# Altium footprint library PcbLib1.PcbLib: 37 footprints (part 2 of 3)
Each footprint in its own frame and in the unit in brackets; x right, y up, seen from the top. Pads: shape width x height; smd on the part's side, far side on the other; paste and mask are expansions set on the pad; w line width, h text height; cw(c..) or ccw(c..) is an arc to the next point about the centre after c.
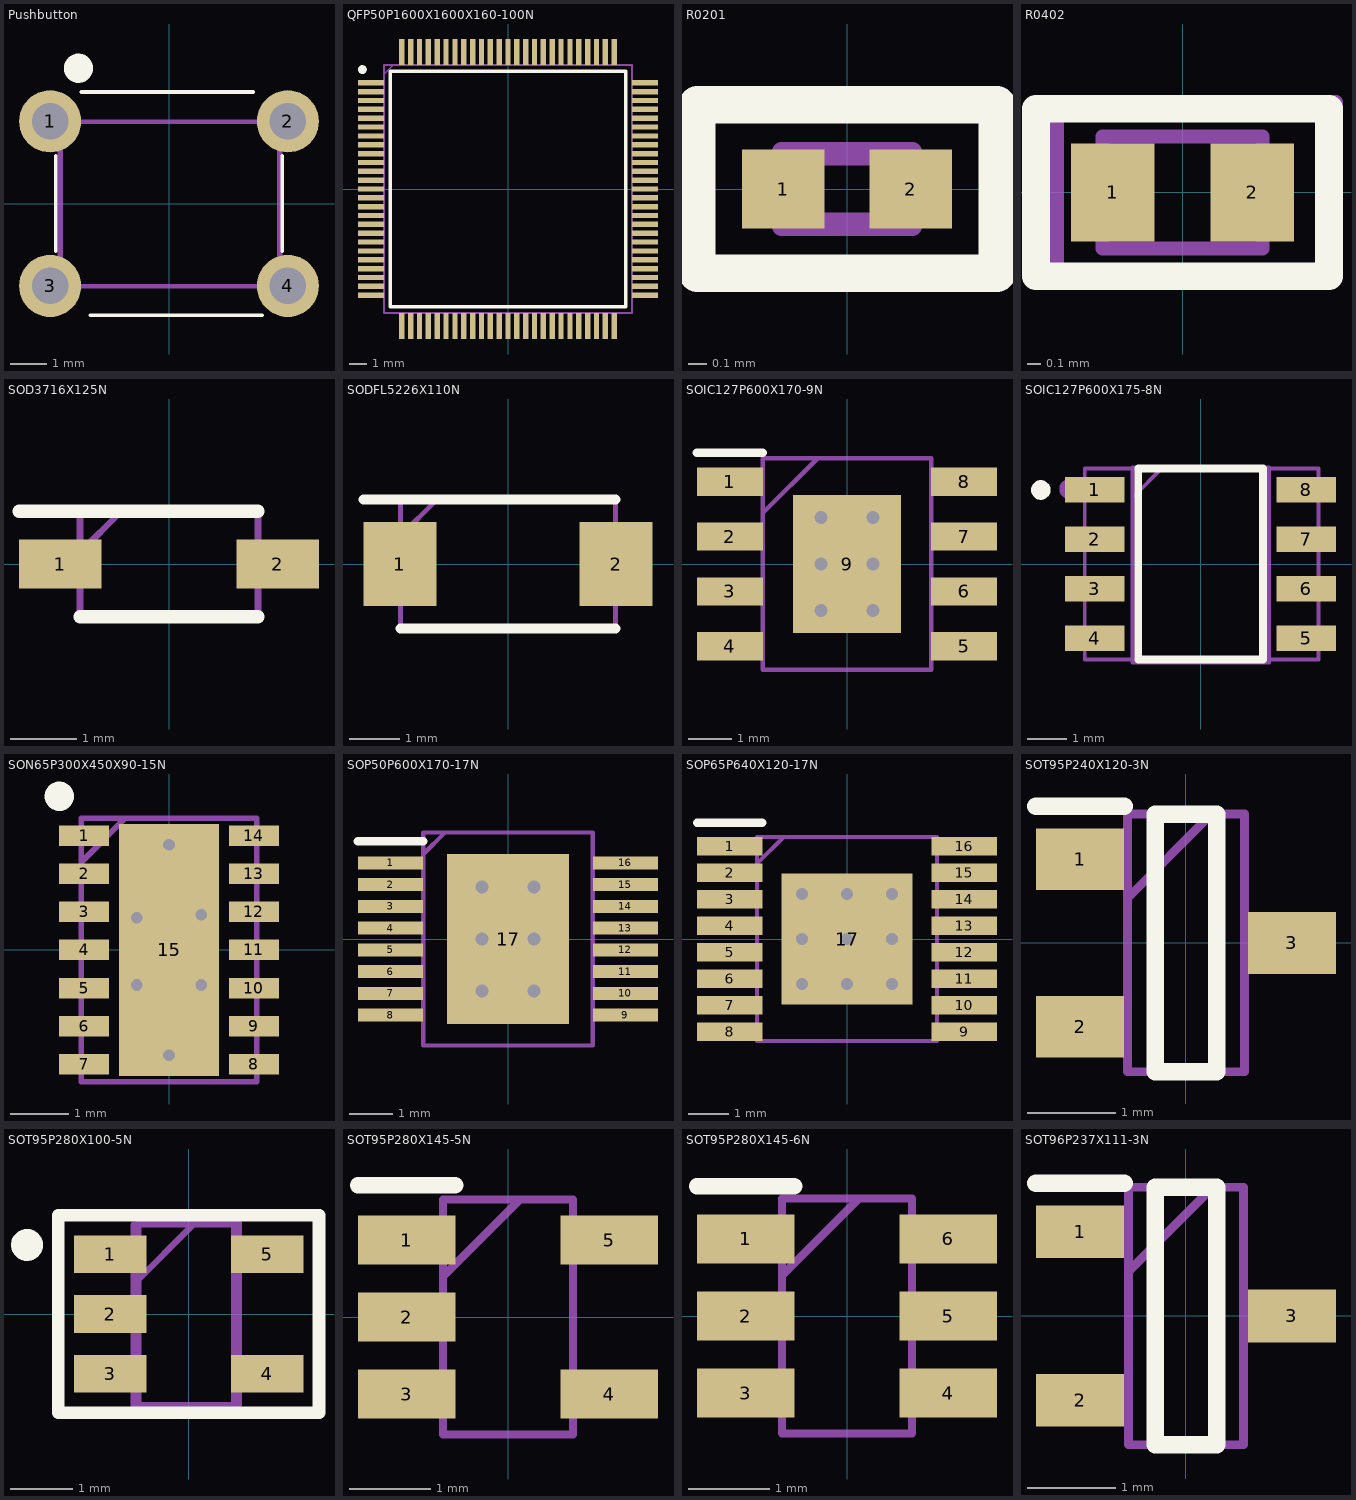
[diagram p1: the footprints below, top view; thin cyan lines are the x and y axes]

## Pushbutton [mm]
pads (4):
  round 1.7 hole 1: 1(-3.25,2.25) 2(3.25,2.25) 3(-3.25,-2.25) 4(3.25,-2.25)
Top Overlay:
  circle w0.4: c-2.475,3.7 r0.2
  lines w0.1: -3.1,-1.3 -3.1,1.3 ; -2.4,3.05 2.3,3.05 ; -2.15,-3.05 2.55,-3.05 ; 3.1,-1.3 3.1,1.3
Mechanical 13:
  circle w0.254: c-3.675,1.925 r0.135
  lines w0.1: -2.95,-2.275 -2.95,2.225 3.05,2.225 3.05,-2.275 -2.95,-2.275
  text ".Designator" at -2.55,-0.242 h0.7
Mechanical 29:
  circle w0.254: c-3.725,1.95 r0.135
  lines w0.1: -3,-2.25 -3,2.25 3,2.25 3,-2.25 -3,-2.25
  text ".Designator" at -2.6,-0.217 h0.7
Mechanical 30:
  text ".Comment" at -3.475,-1.6 h1
3D body "User Library-FSM6JHX(1-1977120-0).STEP": height 7, standoff -3.51, extent -3.9,-2.995 3.9,2.995

## QFP50P1600X1600X160-100N [mm]
pads (100):
  rect 1.475x0.3 smd: 1(-7.738,6) 2(-7.738,5.5) 3(-7.738,5) 4(-7.738,4.5) 5(-7.738,4) 6(-7.738,3.5) 7(-7.738,3) 8(-7.738,2.5) 9(-7.738,2) 10(-7.738,1.5) 11(-7.738,1) 12(-7.738,0.5) 13(-7.738,0) 14(-7.738,-0.5) 15(-7.738,-1) 16(-7.738,-1.5) 17(-7.738,-2) 18(-7.738,-2.5) 19(-7.738,-3) 20(-7.738,-3.5) 21(-7.738,-4) 22(-7.738,-4.5) 23(-7.738,-5) 24(-7.738,-5.5) 25(-7.738,-6) 51(7.738,-6) 52(7.738,-5.5) 53(7.738,-5) 54(7.738,-4.5) 55(7.738,-4) 56(7.738,-3.5) 57(7.738,-3) 58(7.738,-2.5) 59(7.738,-2) 60(7.738,-1.5) 61(7.738,-1) 62(7.738,-0.5) 63(7.738,0) 64(7.738,0.5) 65(7.738,1) 66(7.738,1.5) 67(7.738,2) 68(7.738,2.5) 69(7.738,3) 70(7.738,3.5) 71(7.738,4) 72(7.738,4.5) 73(7.738,5) 74(7.738,5.5) 75(7.738,6)
  rect 0.3x1.475 smd: 26(-6,-7.738) 27(-5.5,-7.738) 28(-5,-7.738) 29(-4.5,-7.738) 30(-4,-7.738) 31(-3.5,-7.738) 32(-3,-7.738) 33(-2.5,-7.738) 34(-2,-7.738) 35(-1.5,-7.738) 36(-1,-7.738) 37(-0.5,-7.738) 38(0,-7.738) 39(0.5,-7.738) 40(1,-7.738) 41(1.5,-7.738) 42(2,-7.738) 43(2.5,-7.738) 44(3,-7.738) 45(3.5,-7.738) 46(4,-7.738) 47(4.5,-7.738) 48(5,-7.738) 49(5.5,-7.738) 50(6,-7.738) 76(6,7.738) 77(5.5,7.738) 78(5,7.738) 79(4.5,7.738) 80(4,7.738) 81(3.5,7.738) 82(3,7.738) 83(2.5,7.738) 84(2,7.738) 85(1.5,7.738) 86(1,7.738) 87(0.5,7.738) 88(0,7.738) 89(-0.5,7.738) 90(-1,7.738) 91(-1.5,7.738) 92(-2,7.738) 93(-2.5,7.738) 94(-3,7.738) 95(-3.5,7.738) 96(-4,7.738) 97(-4.5,7.738) 98(-5,7.738) 99(-5.5,7.738) 100(-6,7.738)
Top Overlay:
  circle w0.25: c-8.225,6.75 r0.125
  lines w0.2: -6.65,-6.65 -6.65,6.65 6.65,6.65 6.65,-6.65 -6.65,-6.65
Mechanical 13:
  lines w0.1: -7,6.5 -6.5,7 ; -7,-7 -7,7 7,7 7,-7 -7,-7
  text ".Designator" at -3.857,-0.356 h1
3D body "TMS5700332BPZQQ1.stp": height 1.6, standoff 0, extent -8,-8 8,8

## R0201 [mm]
pads (2):
  rect 0.44x0.42 smd: 1(-0.34,0) 2(0.34,0)
Top Overlay:
  lines w0.2: -0.8,-0.45 -0.8,0.45 0.8,0.45 0.8,-0.45 -0.8,-0.45
Mechanical 13:
  lines w0.1: -0.35,-0.175 -0.35,0.175 0.35,0.175 0.35,-0.175 -0.35,-0.175
  text ".Designator" at -0.65,-0.183 h0.5
Mechanical 29:
  lines w0.1: -0.35,-0.2 0.35,-0.2 0.35,0.2 -0.35,0.2 -0.35,-0.2
  text ".Designator" at -0.25,0 h0.3
Mechanical 30:
  text ".Comment" at -1.225,-0.7 h0.5
3D body "RC0201FR-0712KL.stp": height 0.26, standoff 0, extent -0.3,-0.15 0.3,0.15

## R0402 [mm]
pads (2):
  rect 0.6x0.7 smd: 1(-0.5,0) 2(0.5,0)
Top Overlay:
  lines w0.2: -1.05,-0.6 -1.05,0.6 1.05,0.6 1.05,-0.6 -1.05,-0.6
Mechanical 13:
  lines w0.1: -0.9,-0.6 -0.9,0.65 1.1,0.65 1.1,-0.6 -0.9,-0.6
  text ".Designator" at -1.307,-0.431 h1
Mechanical 29:
  lines w0.1: -0.575,-0.4 0.575,-0.4 0.575,0.4 -0.575,0.4 -0.575,-0.4
  text "'.Designator'" at -0.675,-0.117 h0.4
Mechanical 30:
  text ".Comment" at -1.425,-0.825 h0.5
3D body "RC0402N_YAG.step": height 0.51, standoff 0.01, extent -0.533,-0.35 0.533,0.361

## SOD3716X125N [mm]
pads (2):
  rect 1.25x0.75 smd: 1(-1.65,0) 2(1.65,0)
Top Overlay:
  lines w0.2: -2.275,0.8 1.35,0.8 ; -1.35,-0.8 1.35,-0.8
Mechanical 13:
  lines w0.1: -1.35,0.175 -0.725,0.8 ; -1.35,-0.8 1.35,-0.8 1.35,0.8 -1.35,0.8 -1.35,-0.8
  text ".Designator" at -1.963,-0.528 h1.1
3D body "1N5819HW-7-F.stp": height 1.25, standoff 0.06, extent -1.35,-0.8 1.35,0.8

## SODFL5226X110N [mm]
pads (2):
  rect 1.46x1.67 smd: 1(-2.15,0) 2(2.15,0)
Top Overlay:
  lines w0.2: -2.88,1.288 2.138,1.288 ; -2.138,-1.288 2.138,-1.288
Mechanical 13:
  lines w0.1: -2.138,0.558 -1.408,1.288 ; -2.138,-1.288 2.138,-1.288 2.138,1.288 -2.138,1.288 -2.138,-1.288
  text ".Designator" at -2.063,-0.428 h1.1
3D body "STPS2L25AFN.stp": height 1.1, standoff 0, extent -2.588,-1.288 2.588,1.288

## SOIC127P600X170-9N [mm]
pads (9):
  rect 1.525x0.65 smd: 1(-2.712,1.905) 2(-2.712,0.635) 3(-2.712,-0.635) 4(-2.712,-1.905) 5(2.712,-1.905) 6(2.712,-0.635) 7(2.712,0.635) 8(2.712,1.905)
  rect 2.51x3.2 smd paste-4: 9(0,0)
via -0.6,1.075 diameter 0.7 hole 0.3
via 0.6,1.075 diameter 0.7 hole 0.3
via -0.6,0 diameter 0.7 hole 0.3
via -0.6,-1.075 diameter 0.7 hole 0.3
via 0.6,0 diameter 0.7 hole 0.3
via 0.6,-1.075 diameter 0.7 hole 0.3
Top Overlay:
  lines w0.2: -3.475,2.58 -1.95,2.58
Top Paste:
  rectangle: 0.15,-1.55 1.05,-0.65
  rectangle: 0.15,-0.45 1.05,0.45
  rectangle: 0.15,0.65 1.05,1.55
  rectangle: -1.05,-1.55 -0.15,-0.65
  rectangle: -1.05,-0.45 -0.15,0.45
  rectangle: -1.05,0.65 -0.15,1.55
Mechanical 13:
  lines w0.1: -1.95,1.18 -0.68,2.45 ; -1.95,-2.45 1.95,-2.45 1.95,2.45 -1.95,2.45 -1.95,-2.45
  text ".Designator" at -2.363,-0.653 h1.1
3D body "A7985ATR.stp": height 1.7, standoff 0, extent -3,-2.45 3,2.45

## SOIC127P600X175-8N [mm]
pads (8):
  rect 1.525x0.65 smd: 1(-2.712,1.905) 2(-2.712,0.635) 3(-2.712,-0.635) 4(-2.712,-1.905) 5(2.712,-1.905) 6(2.712,-0.635) 7(2.712,0.635) 8(2.712,1.905)
Top Overlay:
  circle w0.254: c-4.1,1.9 r0.125
  lines w0.2: -1.6,-2.45 -1.6,2.45 1.6,2.45 1.6,-2.45 -1.6,-2.45
Mechanical 13:
  lines w0.1: -1.725,1.725 -0.975,2.475 ; -1.75,-2.525 1.75,-2.525 1.75,2.475 -1.75,2.475 -1.75,-2.525
  text ".Designator" at -1.938,-0.378 h1.1
Mechanical 29:
  circle w0.254: c-3.375,1.925 r0.125
  lines w0.1: -2.975,-2.45 -2.975,2.45 3.025,2.45 3.025,-2.45 -2.975,-2.45
  text ".Designator" at -3,-0.467 h1
Mechanical 30:
  text ".Comment" at -3,-0.45 h1
3D body "NE555DR.stp": height 1.75, standoff 0, extent -3,-2.45 3,2.45

## SON65P300X450X90-15N [mm]
pads (15):
  rect 0.85x0.35 smd: 1(-1.45,1.95) 2(-1.45,1.3) 3(-1.45,0.65) 4(-1.45,0) 5(-1.45,-0.65) 6(-1.45,-1.3) 7(-1.45,-1.95) 8(1.45,-1.95) 9(1.45,-1.3) 10(1.45,-0.65) 11(1.45,0) 12(1.45,0.65) 13(1.45,1.3) 14(1.45,1.95)
  rect 1.7x4.3 smd paste-5: 15(0,0)
via 0,1.8 diameter 0.5 hole 0.2
via -0.55,0.55 diameter 0.5 hole 0.2
via -0.55,-0.6 diameter 0.5 hole 0.2
via 0,-1.8 diameter 0.5 hole 0.2
via 0.55,-0.6 diameter 0.5 hole 0.2
via 0.55,0.6 diameter 0.5 hole 0.2
Top Overlay:
  circle w0.25: c-1.875,2.625 r0.125
Top Paste:
  rectangle: -0.55,-2.1 0.55,-1
  rectangle: -0.55,-0.55 0.55,0.55
  rectangle: -0.55,1 0.55,2.1
Mechanical 13:
  lines w0.1: -1.5,1.5 -0.75,2.25 ; -1.5,-2.25 1.5,-2.25 1.5,2.25 -1.5,2.25 -1.5,-2.25
  text ".Designator" at -1.988,-0.378 h1.1
3D body "TCAN1043DMTRQ1.stp": height 0.9, standoff 0, extent -1.55,-2.25 1.55,2.25

## SOP50P600X170-17N [mm]
pads (17):
  rect 1.5x0.3 smd: 1(-2.7,1.75) 2(-2.7,1.25) 3(-2.7,0.75) 4(-2.7,0.25) 5(-2.7,-0.25) 6(-2.7,-0.75) 7(-2.7,-1.25) 8(-2.7,-1.75) 9(2.7,-1.75) 10(2.7,-1.25) 11(2.7,-0.75) 12(2.7,-0.25) 13(2.7,0.25) 14(2.7,0.75) 15(2.7,1.25) 16(2.7,1.75)
  rect 2.8x3.91 smd paste-4: 17(0,0)
via 0.6,-1.2 diameter 0.7 hole 0.3
via -0.6,-1.2 diameter 0.7 hole 0.3
via -0.6,0 diameter 0.7 hole 0.3
via -0.6,1.2 diameter 0.7 hole 0.3
via 0.6,1.2 diameter 0.7 hole 0.3
via 0.6,0 diameter 0.7 hole 0.3
Top Overlay:
  lines w0.2: -3.45,2.25 -1.95,2.25
Top Paste:
  rectangle: -1.25,-0.55 -0.15,0.55
  rectangle: 0.15,-0.55 1.25,0.55
  rectangle: 0.15,-1.85 1.25,-0.75
  rectangle: -1.25,-1.85 -0.15,-0.75
  rectangle: 0.15,0.75 1.25,1.85
  rectangle: -1.25,0.75 -0.15,1.85
Mechanical 13:
  lines w0.1: -1.95,1.95 -1.45,2.45 ; -1.95,-2.45 -1.95,2.45 1.95,2.45 1.95,-2.45 -1.95,-2.45
  text ".Designator" at -2.163,-0.653 h1.1
3D body "VND7020AJTR.stp": height 1.7, standoff 0, extent -3,-2.45 3,2.45

## SOP65P640X120-17N [mm]
pads (17):
  rect 1.6x0.45 smd: 1(-2.875,2.275) 2(-2.875,1.625) 3(-2.875,0.975) 4(-2.875,0.325) 5(-2.875,-0.325) 6(-2.875,-0.975) 7(-2.875,-1.625) 8(-2.875,-2.275) 9(2.875,-2.275) 10(2.875,-1.625) 11(2.875,-0.975) 12(2.875,-0.325) 13(2.875,0.325) 14(2.875,0.975) 15(2.875,1.625) 16(2.875,2.275)
  rect 3.2x3.2 smd paste-3: 17(0,0)
via 0,0 diameter 0.7 hole 0.3
via -1.1,0 diameter 0.7 hole 0.3
via 1.1,0 diameter 0.7 hole 0.3
via -1.1,1.1 diameter 0.7 hole 0.3
via -1.1,-1.1 diameter 0.7 hole 0.3
via 0,-1.1 diameter 0.7 hole 0.3
via 0,1.1 diameter 0.7 hole 0.3
via 1.1,-1.1 diameter 0.7 hole 0.3
via 1.1,1.1 diameter 0.7 hole 0.3
Top Overlay:
  lines w0.2: -3.675,2.85 -2.075,2.85
Top Paste:
  rectangle: -1.525,0.625 -0.625,1.525
  rectangle: -1.525,-0.45 -0.625,0.45
  rectangle: -1.525,-1.525 -0.625,-0.625
  rectangle: -0.45,0.625 0.45,1.525
  rectangle: -0.45,-0.45 0.45,0.45
  rectangle: -0.45,-1.525 0.45,-0.625
  rectangle: 0.625,0.625 1.525,1.525
  rectangle: 0.625,-0.45 1.525,0.45
  rectangle: 0.625,-1.525 1.525,-0.625
Mechanical 13:
  lines w0.1: -2.2,1.85 -1.55,2.5 ; -2.2,-2.5 -2.2,2.5 2.2,2.5 2.2,-2.5 -2.2,-2.5
  text ".Designator" at -2.213,-0.703 h1.1
3D body "A7987TR.stp": height 1.2, standoff 0, extent -3.2,-2.5 3.2,2.5

## SOT95P240X120-3N [mm]
pads (3):
  rect 1x0.7 smd: 1(-1.2,0.95) 2(-1.2,-0.95) 3(1.2,0)
Top Overlay:
  lines w0.2: -1.7,1.55 -0.7,1.55 ; -0.35,-1.46 -0.35,1.46 0.35,1.46 0.35,-1.46 -0.35,-1.46
Mechanical 13:
  lines w0.1: -0.662,0.51 0.288,1.46 ; -0.662,-1.46 -0.662,1.46 0.662,1.46 0.662,-1.46 -0.662,-1.46
  text ".Designator" at -1.888,-0.428 h1.1
3D body "MMBT5401.stp": height 1.2, standoff 0, extent -1.2,-1.46 1.2,1.46

## SOT95P280X100-5N [mm]
pads (5):
  rect 1.15x0.6 smd: 1(-1.25,0.95) 2(-1.25,0) 3(-1.25,-0.95) 4(1.25,-0.95) 5(1.25,0.95)
Top Overlay:
  circle w0.254: c-2.575,1.1 r0.127
  lines w0.2: -2.075,-1.575 -2.075,1.575 2.075,1.575 2.075,-1.575 -2.075,-1.575
Mechanical 13:
  lines w0.1: -0.875,0.475 0.075,1.425 ; -0.875,-1.475 0.725,-1.475 0.725,1.425 -0.875,1.425 -0.875,-1.475
  text ".Designator" at -2.088,-0.253 h1.1
Mechanical 29:
  circle w0.254: c-1.25,1 r0.056
  lines w0.1: -0.8,-1.45 -0.8,1.45 0.8,1.45 0.8,-1.45 -0.8,-1.45
  text ".Designator" at -1.275,-0.408 h0.8
Mechanical 30:
  text ".Comment" at -1.775,-1.7 h1
3D body "AD8538AUJZ-REEL7.stp": height 1, standoff 0, extent -1.4,-1.45 1.4,1.45

## SOT95P280X145-5N [mm]
pads (5):
  rect 1.2x0.6 smd: 1(-1.25,0.95) 2(-1.25,0) 3(-1.25,-0.95) 4(1.25,-0.95) 5(1.25,0.95)
Top Overlay:
  lines w0.2: -1.85,1.625 -0.65,1.625
Mechanical 13:
  lines w0.1: -0.8,0.5 0.15,1.45 ; -0.8,-1.45 0.8,-1.45 0.8,1.45 -0.8,1.45 -0.8,-1.45
  text ".Designator" at -2.013,-0.228 h1.1
3D body "INA193AQDBVRQ1.stp": height 1.2, standoff 0, extent -1.4,-1.45 1.4,1.45

## SOT95P280X145-6N [mm]
pads (6):
  rect 1.2x0.6 smd: 1(-1.25,0.95) 2(-1.25,0) 3(-1.25,-0.95) 4(1.25,-0.95) 5(1.25,0) 6(1.25,0.95)
Top Overlay:
  lines w0.2: -1.85,1.6 -0.65,1.6
Mechanical 13:
  lines w0.1: -0.8,0.5 0.15,1.45 ; -0.8,-1.45 0.8,-1.45 0.8,1.45 -0.8,1.45 -0.8,-1.45
  text ".Designator" at -1.463,-0.603 h1.1
3D body "REF3430TIDBVR.stp": height 1.2, standoff 0, extent -1.4,-1.45 1.4,1.45

## SOT96P237X111-3N [mm]
pads (3):
  rect 1x0.6 smd: 1(-1.2,0.955) 2(-1.2,-0.955) 3(1.2,0)
Top Overlay:
  lines w0.2: -1.7,1.505 -0.7,1.505 ; -0.35,-1.46 0.35,-1.46 0.35,1.46 -0.35,1.46 -0.35,-1.46
Mechanical 13:
  lines w0.1: -0.65,0.505 0.305,1.46 ; -0.65,-1.46 0.65,-1.46 0.65,1.46 -0.65,1.46 -0.65,-1.46
  text ".Designator" at -1.313,-0.553 h1.1
3D body "BZX84C12LT1G.stp": height 1.11, standoff 0, extent -1.185,-1.46 1.185,1.46